# EAGLE library part USB4135-GF-A (library astra)
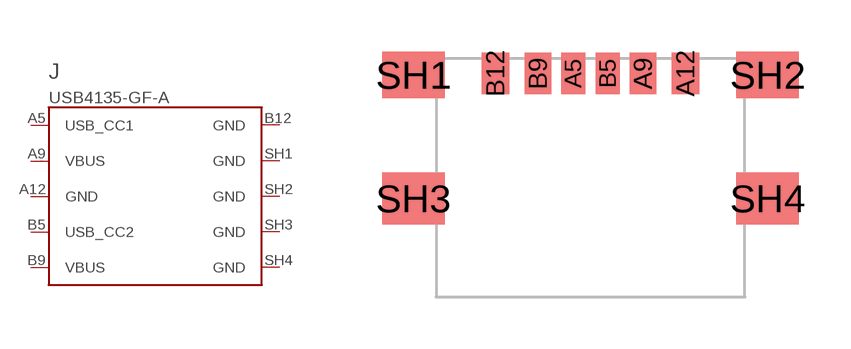
[diagram p0: symbol with the pads of GCT_USB4135; footprint GCT_USB4135]

Designator prefix J

## USB4135-GF-A  [GCT_USB4135]
A5  USB_CC1  pas
A9  VBUS  pas
A12  GND  pas
B5  USB_CC2  pas
B9  VBUS  pas
B12  GND  pas
SH1  GND  pas
SH2  GND  pas
SH3  GND  pas
SH4  GND  pas

## Footprint GCT_USB4135 (pad centres in mm)
GCT USB4135 drawing rev A2, top-side Recommended PCB Layout. Origin on nominal case center; mating face y=-3.45 mm. Shell terminals outside case width. Worst-case mechanical envelope 3.35 mm. https://gct.co/files/drawings/usb4135.pdf
smd 0.7 x 1.2: A5 -0.5,3.03; B5 0.5,3.03
smd 0.76 x 1.2: A9 1.52,3.03; B9 -1.52,3.03
smd 0.8 x 1.2: A12 2.75,3.03; B12 -2.75,3.03
smd 1.8 x 1.35: SH1 -5.125,2.98; SH2 5.125,2.98
smd 1.8 x 1.5: SH3 -5.125,-0.6; SH4 5.125,-0.6